# EAGLE library part NUCLEO-H755ZI-Q (library moto-core)
NUCLEO-H755ZI-Q STM32H755ZI Nucleo-144 (M7 rt-core + M4 safety). ST morpho CN11/CN12 + ZIO CN7..CN10. Kart: 70.0 x 133.34 mm - Guven: L STEP: NUCLEO-H755ZI-Q STEP (st.com > CAD resources) / GrabCAD 'Nucleo-144' NOT: Pin isimleri konnektor-pin olarak (CN11-1..). Sinyal adlari UM2408 'ST morpho' ve 'ZIO' tablolarindan doldurulmali. Header X/Y konumlari yaklasik: ST mekanik cizimiyle (MB1363) dogrula.
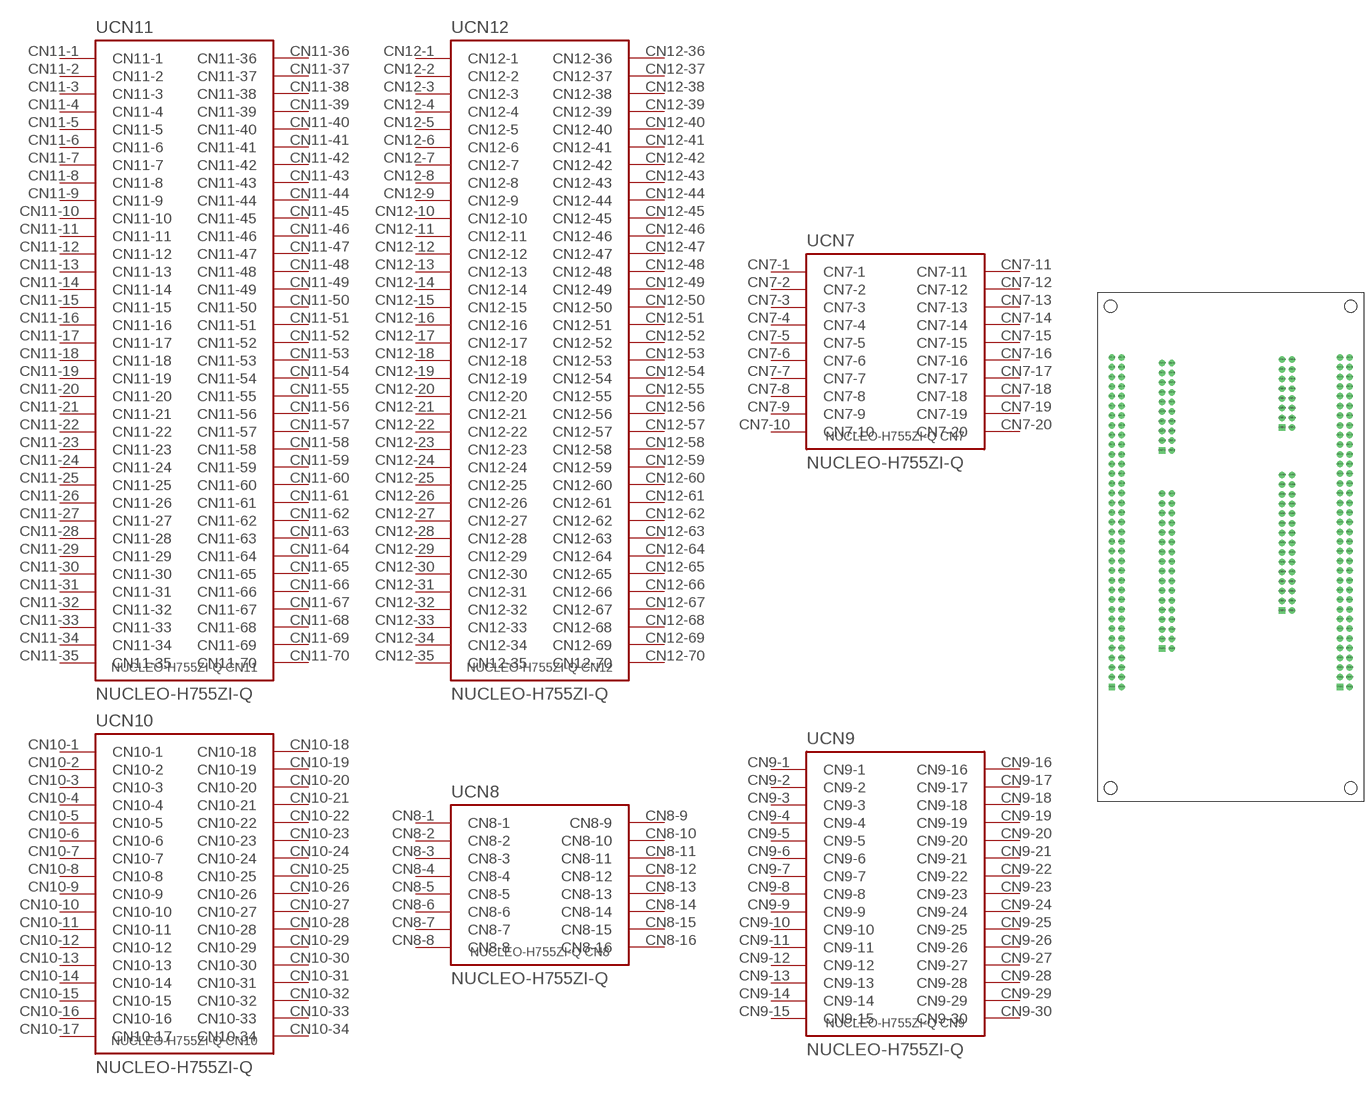
[diagram p0: symbol with the pads of NUCLEO-H755ZI-Q; footprint NUCLEO-H755ZI-Q]

Designator prefix U; gates CN11=NUCLEO-H755ZI-Q_CN11 CN12=NUCLEO-H755ZI-Q_CN12 CN7=NUCLEO-H755ZI-Q_CN7 CN10=NUCLEO-H755ZI-Q_CN10 CN8=NUCLEO-H755ZI-Q_CN8 CN9=NUCLEO-H755ZI-Q_CN9

## NUCLEO-H755ZI-Q (BOARD_SIZE: 70.0x133.34mm; CONFIDENCE: L)  [NUCLEO-H755ZI-Q]
CN7-1  CN7:CN7-1  pas
CN7-2  CN7:CN7-2  pas
CN7-3  CN7:CN7-3  pas
CN7-4  CN7:CN7-4  pas
CN7-5  CN7:CN7-5  pas
CN7-6  CN7:CN7-6  pas
CN7-7  CN7:CN7-7  pas
CN7-8  CN7:CN7-8  pas
CN7-9  CN7:CN7-9  pas
CN7-10  CN7:CN7-10  pas
CN7-11  CN7:CN7-11  pas
CN7-12  CN7:CN7-12  pas
CN7-13  CN7:CN7-13  pas
CN7-14  CN7:CN7-14  pas
CN7-15  CN7:CN7-15  pas
CN7-16  CN7:CN7-16  pas
CN7-17  CN7:CN7-17  pas
CN7-18  CN7:CN7-18  pas
CN7-19  CN7:CN7-19  pas
CN7-20  CN7:CN7-20  pas
CN8-1  CN8:CN8-1  pas
CN8-2  CN8:CN8-2  pas
CN8-3  CN8:CN8-3  pas
CN8-4  CN8:CN8-4  pas
CN8-5  CN8:CN8-5  pas
CN8-6  CN8:CN8-6  pas
CN8-7  CN8:CN8-7  pas
CN8-8  CN8:CN8-8  pas
CN8-9  CN8:CN8-9  pas
CN8-10  CN8:CN8-10  pas
CN8-11  CN8:CN8-11  pas
CN8-12  CN8:CN8-12  pas
CN8-13  CN8:CN8-13  pas
CN8-14  CN8:CN8-14  pas
CN8-15  CN8:CN8-15  pas
CN8-16  CN8:CN8-16  pas
CN9-1  CN9:CN9-1  pas
CN9-2  CN9:CN9-2  pas
CN9-3  CN9:CN9-3  pas
CN9-4  CN9:CN9-4  pas
CN9-5  CN9:CN9-5  pas
CN9-6  CN9:CN9-6  pas
CN9-7  CN9:CN9-7  pas
CN9-8  CN9:CN9-8  pas
CN9-9  CN9:CN9-9  pas
CN9-10  CN9:CN9-10  pas
CN9-11  CN9:CN9-11  pas
CN9-12  CN9:CN9-12  pas
CN9-13  CN9:CN9-13  pas
CN9-14  CN9:CN9-14  pas
CN9-15  CN9:CN9-15  pas
CN9-16  CN9:CN9-16  pas
CN9-17  CN9:CN9-17  pas
CN9-18  CN9:CN9-18  pas
CN9-19  CN9:CN9-19  pas
CN9-20  CN9:CN9-20  pas
CN9-21  CN9:CN9-21  pas
CN9-22  CN9:CN9-22  pas
CN9-23  CN9:CN9-23  pas
CN9-24  CN9:CN9-24  pas
CN9-25  CN9:CN9-25  pas
CN9-26  CN9:CN9-26  pas
CN9-27  CN9:CN9-27  pas
CN9-28  CN9:CN9-28  pas
CN9-29  CN9:CN9-29  pas
CN9-30  CN9:CN9-30  pas
CN10-1  CN10:CN10-1  pas
CN10-2  CN10:CN10-2  pas
CN10-3  CN10:CN10-3  pas
CN10-4  CN10:CN10-4  pas
CN10-5  CN10:CN10-5  pas
CN10-6  CN10:CN10-6  pas
CN10-7  CN10:CN10-7  pas
CN10-8  CN10:CN10-8  pas
CN10-9  CN10:CN10-9  pas
CN10-10  CN10:CN10-10  pas
CN10-11  CN10:CN10-11  pas
CN10-12  CN10:CN10-12  pas
CN10-13  CN10:CN10-13  pas
CN10-14  CN10:CN10-14  pas
CN10-15  CN10:CN10-15  pas
CN10-16  CN10:CN10-16  pas
CN10-17  CN10:CN10-17  pas
CN10-18  CN10:CN10-18  pas
CN10-19  CN10:CN10-19  pas
CN10-20  CN10:CN10-20  pas
CN10-21  CN10:CN10-21  pas
CN10-22  CN10:CN10-22  pas
CN10-23  CN10:CN10-23  pas
CN10-24  CN10:CN10-24  pas
CN10-25  CN10:CN10-25  pas
CN10-26  CN10:CN10-26  pas
CN10-27  CN10:CN10-27  pas
CN10-28  CN10:CN10-28  pas
CN10-29  CN10:CN10-29  pas
CN10-30  CN10:CN10-30  pas
CN10-31  CN10:CN10-31  pas
CN10-32  CN10:CN10-32  pas
CN10-33  CN10:CN10-33  pas
CN10-34  CN10:CN10-34  pas
CN11-1  CN11:CN11-1  pas
CN11-2  CN11:CN11-2  pas
CN11-3  CN11:CN11-3  pas
CN11-4  CN11:CN11-4  pas
CN11-5  CN11:CN11-5  pas
CN11-6  CN11:CN11-6  pas
CN11-7  CN11:CN11-7  pas
CN11-8  CN11:CN11-8  pas
CN11-9  CN11:CN11-9  pas
CN11-10  CN11:CN11-10  pas
CN11-11  CN11:CN11-11  pas
CN11-12  CN11:CN11-12  pas
CN11-13  CN11:CN11-13  pas
CN11-14  CN11:CN11-14  pas
CN11-15  CN11:CN11-15  pas
CN11-16  CN11:CN11-16  pas
CN11-17  CN11:CN11-17  pas
CN11-18  CN11:CN11-18  pas
CN11-19  CN11:CN11-19  pas
CN11-20  CN11:CN11-20  pas
CN11-21  CN11:CN11-21  pas
CN11-22  CN11:CN11-22  pas
CN11-23  CN11:CN11-23  pas
CN11-24  CN11:CN11-24  pas
CN11-25  CN11:CN11-25  pas
CN11-26  CN11:CN11-26  pas
CN11-27  CN11:CN11-27  pas
CN11-28  CN11:CN11-28  pas
CN11-29  CN11:CN11-29  pas
CN11-30  CN11:CN11-30  pas
CN11-31  CN11:CN11-31  pas
CN11-32  CN11:CN11-32  pas
CN11-33  CN11:CN11-33  pas
CN11-34  CN11:CN11-34  pas
CN11-35  CN11:CN11-35  pas
CN11-36  CN11:CN11-36  pas
CN11-37  CN11:CN11-37  pas
CN11-38  CN11:CN11-38  pas
CN11-39  CN11:CN11-39  pas
CN11-40  CN11:CN11-40  pas
CN11-41  CN11:CN11-41  pas
CN11-42  CN11:CN11-42  pas
CN11-43  CN11:CN11-43  pas
CN11-44  CN11:CN11-44  pas
CN11-45  CN11:CN11-45  pas
CN11-46  CN11:CN11-46  pas
CN11-47  CN11:CN11-47  pas
CN11-48  CN11:CN11-48  pas
CN11-49  CN11:CN11-49  pas
CN11-50  CN11:CN11-50  pas
CN11-51  CN11:CN11-51  pas
CN11-52  CN11:CN11-52  pas
CN11-53  CN11:CN11-53  pas
CN11-54  CN11:CN11-54  pas
CN11-55  CN11:CN11-55  pas
CN11-56  CN11:CN11-56  pas
CN11-57  CN11:CN11-57  pas
CN11-58  CN11:CN11-58  pas
CN11-59  CN11:CN11-59  pas
CN11-60  CN11:CN11-60  pas
CN11-61  CN11:CN11-61  pas
CN11-62  CN11:CN11-62  pas
CN11-63  CN11:CN11-63  pas
CN11-64  CN11:CN11-64  pas
CN11-65  CN11:CN11-65  pas
CN11-66  CN11:CN11-66  pas
CN11-67  CN11:CN11-67  pas
CN11-68  CN11:CN11-68  pas
CN11-69  CN11:CN11-69  pas
CN11-70  CN11:CN11-70  pas
CN12-1  CN12:CN12-1  pas
CN12-2  CN12:CN12-2  pas
CN12-3  CN12:CN12-3  pas
CN12-4  CN12:CN12-4  pas
CN12-5  CN12:CN12-5  pas
CN12-6  CN12:CN12-6  pas
CN12-7  CN12:CN12-7  pas
CN12-8  CN12:CN12-8  pas
CN12-9  CN12:CN12-9  pas
CN12-10  CN12:CN12-10  pas
CN12-11  CN12:CN12-11  pas
CN12-12  CN12:CN12-12  pas
CN12-13  CN12:CN12-13  pas
CN12-14  CN12:CN12-14  pas
CN12-15  CN12:CN12-15  pas
CN12-16  CN12:CN12-16  pas
CN12-17  CN12:CN12-17  pas
CN12-18  CN12:CN12-18  pas
CN12-19  CN12:CN12-19  pas
CN12-20  CN12:CN12-20  pas
CN12-21  CN12:CN12-21  pas
CN12-22  CN12:CN12-22  pas
CN12-23  CN12:CN12-23  pas
CN12-24  CN12:CN12-24  pas
CN12-25  CN12:CN12-25  pas
CN12-26  CN12:CN12-26  pas
CN12-27  CN12:CN12-27  pas
CN12-28  CN12:CN12-28  pas
CN12-29  CN12:CN12-29  pas
CN12-30  CN12:CN12-30  pas
CN12-31  CN12:CN12-31  pas
CN12-32  CN12:CN12-32  pas
CN12-33  CN12:CN12-33  pas
CN12-34  CN12:CN12-34  pas
CN12-35  CN12:CN12-35  pas
CN12-36  CN12:CN12-36  pas
CN12-37  CN12:CN12-37  pas
CN12-38  CN12:CN12-38  pas
CN12-39  CN12:CN12-39  pas
CN12-40  CN12:CN12-40  pas
CN12-41  CN12:CN12-41  pas
CN12-42  CN12:CN12-42  pas
CN12-43  CN12:CN12-43  pas
CN12-44  CN12:CN12-44  pas
CN12-45  CN12:CN12-45  pas
CN12-46  CN12:CN12-46  pas
CN12-47  CN12:CN12-47  pas
CN12-48  CN12:CN12-48  pas
CN12-49  CN12:CN12-49  pas
CN12-50  CN12:CN12-50  pas
CN12-51  CN12:CN12-51  pas
CN12-52  CN12:CN12-52  pas
CN12-53  CN12:CN12-53  pas
CN12-54  CN12:CN12-54  pas
CN12-55  CN12:CN12-55  pas
CN12-56  CN12:CN12-56  pas
CN12-57  CN12:CN12-57  pas
CN12-58  CN12:CN12-58  pas
CN12-59  CN12:CN12-59  pas
CN12-60  CN12:CN12-60  pas
CN12-61  CN12:CN12-61  pas
CN12-62  CN12:CN12-62  pas
CN12-63  CN12:CN12-63  pas
CN12-64  CN12:CN12-64  pas
CN12-65  CN12:CN12-65  pas
CN12-66  CN12:CN12-66  pas
CN12-67  CN12:CN12-67  pas
CN12-68  CN12:CN12-68  pas
CN12-69  CN12:CN12-69  pas
CN12-70  CN12:CN12-70  pas

## Footprint NUCLEO-H755ZI-Q (pad centres in mm)
STM32H755ZI Nucleo-144 (M7 rt-core + M4 safety). ST morpho CN11/CN12 + ZIO CN7..CN10. | Kart: 70.0 x 133.34 mm | Guven: L
drill 1 pad 1.7 square: CN7-1 -18,25.33; CN8-1 13.5,31.33; CN9-1 13.5,-16.67; CN10-1 -18,-26.67; CN11-1 -31.19,-36.67; CN12-1 28.65,-36.67
drill 1 pad 1.7 round: CN7-2 -15.46,25.33; CN7-3 -18,27.87; CN7-4 -15.46,27.87; CN7-5 -18,30.41; CN7-6 -15.46,30.41; CN7-7 -18,32.95; CN7-8 -15.46,32.95; CN7-9 -18,35.49; CN7-10 -15.46,35.49; CN7-11 -18,38.03; CN7-12 -15.46,38.03; CN7-13 -18,40.57; CN7-14 -15.46,40.57; CN7-15 -18,43.11; CN7-16 -15.46,43.11; CN7-17 -18,45.65; CN7-18 -15.46,45.65; CN7-19 -18,48.19; CN7-20 -15.46,48.19; CN8-2 16.04,31.33; CN8-3 13.5,33.87; CN8-4 16.04,33.87; CN8-5 13.5,36.41; CN8-6 16.04,36.41; CN8-7 13.5,38.95; CN8-8 16.04,38.95; CN8-9 13.5,41.49; CN8-10 16.04,41.49; CN8-11 13.5,44.03; CN8-12 16.04,44.03; CN8-13 13.5,46.57; CN8-14 16.04,46.57; CN8-15 13.5,49.11; CN8-16 16.04,49.11; CN9-2 16.04,-16.67; CN9-3 13.5,-14.13; CN9-4 16.04,-14.13; CN9-5 13.5,-11.59; CN9-6 16.04,-11.59; CN9-7 13.5,-9.05; CN9-8 16.04,-9.05; CN9-9 13.5,-6.51; CN9-10 16.04,-6.51; CN9-11 13.5,-3.97; CN9-12 16.04,-3.97; CN9-13 13.5,-1.43; CN9-14 16.04,-1.43; CN9-15 13.5,1.11; CN9-16 16.04,1.11; CN9-17 13.5,3.65; CN9-18 16.04,3.65; CN9-19 13.5,6.19; CN9-20 16.04,6.19; CN9-21 13.5,8.73; CN9-22 16.04,8.73; CN9-23 13.5,11.27; CN9-24 16.04,11.27; CN9-25 13.5,13.81; CN9-26 16.04,13.81; CN9-27 13.5,16.35; CN9-28 16.04,16.35; CN9-29 13.5,18.89; CN9-30 16.04,18.89; CN10-2 -15.46,-26.67; CN10-3 -18,-24.13; CN10-4 -15.46,-24.13; CN10-5 -18,-21.59; CN10-6 -15.46,-21.59; CN10-7 -18,-19.05; CN10-8 -15.46,-19.05; CN10-9 -18,-16.51; CN10-10 -15.46,-16.51; CN10-11 -18,-13.97; CN10-12 -15.46,-13.97; CN10-13 -18,-11.43; CN10-14 -15.46,-11.43; CN10-15 -18,-8.89; CN10-16 -15.46,-8.89; CN10-17 -18,-6.35; CN10-18 -15.46,-6.35; CN10-19 -18,-3.81; CN10-20 -15.46,-3.81; CN10-21 -18,-1.27; CN10-22 -15.46,-1.27; CN10-23 -18,1.27; CN10-24 -15.46,1.27; CN10-25 -18,3.81; CN10-26 -15.46,3.81; CN10-27 -18,6.35; CN10-28 -15.46,6.35; CN10-29 -18,8.89; CN10-30 -15.46,8.89; CN10-31 -18,11.43; CN10-32 -15.46,11.43; CN10-33 -18,13.97; CN10-34 -15.46,13.97; CN11-2 -28.65,-36.67; CN11-3 -31.19,-34.13; CN11-4 -28.65,-34.13; CN11-5 -31.19,-31.59; CN11-6 -28.65,-31.59; CN11-7 -31.19,-29.05; CN11-8 -28.65,-29.05; CN11-9 -31.19,-26.51; CN11-10 -28.65,-26.51; CN11-11 -31.19,-23.97; CN11-12 -28.65,-23.97; CN11-13 -31.19,-21.43; CN11-14 -28.65,-21.43; CN11-15 -31.19,-18.89; CN11-16 -28.65,-18.89; CN11-17 -31.19,-16.35; CN11-18 -28.65,-16.35; CN11-19 -31.19,-13.81; CN11-20 -28.65,-13.81; CN11-21 -31.19,-11.27; CN11-22 -28.65,-11.27; CN11-23 -31.19,-8.73; CN11-24 -28.65,-8.73; CN11-25 -31.19,-6.19; CN11-26 -28.65,-6.19; CN11-27 -31.19,-3.65; CN11-28 -28.65,-3.65; CN11-29 -31.19,-1.11; CN11-30 -28.65,-1.11; CN11-31 -31.19,1.43; CN11-32 -28.65,1.43; CN11-33 -31.19,3.97; CN11-34 -28.65,3.97; CN11-35 -31.19,6.51; CN11-36 -28.65,6.51; CN11-37 -31.19,9.05; CN11-38 -28.65,9.05; CN11-39 -31.19,11.59; CN11-40 -28.65,11.59; CN11-41 -31.19,14.13; CN11-42 -28.65,14.13; CN11-43 -31.19,16.67; CN11-44 -28.65,16.67; CN11-45 -31.19,19.21; CN11-46 -28.65,19.21; CN11-47 -31.19,21.75; CN11-48 -28.65,21.75; CN11-49 -31.19,24.29; CN11-50 -28.65,24.29; CN11-51 -31.19,26.83; CN11-52 -28.65,26.83; CN11-53 -31.19,29.37; CN11-54 -28.65,29.37; CN11-55 -31.19,31.91; CN11-56 -28.65,31.91; CN11-57 -31.19,34.45; CN11-58 -28.65,34.45; CN11-59 -31.19,36.99; CN11-60 -28.65,36.99; CN11-61 -31.19,39.53; CN11-62 -28.65,39.53; CN11-63 -31.19,42.07; CN11-64 -28.65,42.07; CN11-65 -31.19,44.61; CN11-66 -28.65,44.61; CN11-67 -31.19,47.15; CN11-68 -28.65,47.15; CN11-69 -31.19,49.69; CN11-70 -28.65,49.69; CN12-2 31.19,-36.67; CN12-3 28.65,-34.13; CN12-4 31.19,-34.13; CN12-5 28.65,-31.59; CN12-6 31.19,-31.59; CN12-7 28.65,-29.05; CN12-8 31.19,-29.05; CN12-9 28.65,-26.51; CN12-10 31.19,-26.51; CN12-11 28.65,-23.97; CN12-12 31.19,-23.97; CN12-13 28.65,-21.43; CN12-14 31.19,-21.43; CN12-15 28.65,-18.89; CN12-16 31.19,-18.89; CN12-17 28.65,-16.35; CN12-18 31.19,-16.35; CN12-19 28.65,-13.81; CN12-20 31.19,-13.81; CN12-21 28.65,-11.27; CN12-22 31.19,-11.27; CN12-23 28.65,-8.73; CN12-24 31.19,-8.73; CN12-25 28.65,-6.19; CN12-26 31.19,-6.19; CN12-27 28.65,-3.65; CN12-28 31.19,-3.65; CN12-29 28.65,-1.11; CN12-30 31.19,-1.11; CN12-31 28.65,1.43; CN12-32 31.19,1.43; CN12-33 28.65,3.97; CN12-34 31.19,3.97; CN12-35 28.65,6.51; CN12-36 31.19,6.51; CN12-37 28.65,9.05; CN12-38 31.19,9.05; CN12-39 28.65,11.59; CN12-40 31.19,11.59; CN12-41 28.65,14.13; CN12-42 31.19,14.13; CN12-43 28.65,16.67; CN12-44 31.19,16.67; CN12-45 28.65,19.21; CN12-46 31.19,19.21; CN12-47 28.65,21.75; CN12-48 31.19,21.75; CN12-49 28.65,24.29; CN12-50 31.19,24.29; CN12-51 28.65,26.83; CN12-52 31.19,26.83; CN12-53 28.65,29.37; CN12-54 31.19,29.37; CN12-55 28.65,31.91; CN12-56 31.19,31.91; CN12-57 28.65,34.45; CN12-58 31.19,34.45; CN12-59 28.65,36.99; CN12-60 31.19,36.99; CN12-61 28.65,39.53; CN12-62 31.19,39.53; CN12-63 28.65,42.07; CN12-64 31.19,42.07; CN12-65 28.65,44.61; CN12-66 31.19,44.61; CN12-67 28.65,47.15; CN12-68 31.19,47.15; CN12-69 28.65,49.69; CN12-70 31.19,49.69
hole 3.2 at -31.5,-63.17
hole 3.2 at 31.5,-63.17
hole 3.2 at -31.5,63.13
hole 3.2 at 31.5,63.13